# Altium schematic symbol library ACS712-05B.SchLib: 1 symbol
Pins are listed as number, name and electrical type; pins without a type are passive.

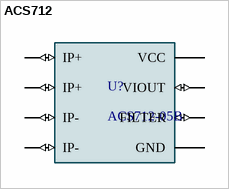
[diagram p0: symbol ACS712]

## ACS712
designator U?, comment ACS712-05B
Current Sensor 5A 1 Channel Hall Effect, Open Loop Bidirectional 8-SOIC _0.154, 3.90mm Width_; MF: Allegro; MP: ACS712ELCTR-05B-T; Value: ACS712-05B; SnapEDA_Link: https://www.snapeda.com/parts/ACS712ELCTR-05B-T/Allegro%20Industries/view-part/217679/?ref=snap; Availability: Unavailable; Package: SOIC-8 Allegro MicroSystems LLC; Price: None
footprint ACS712-05B (SOIC8-1.27-5X4MM)
pins: 1 IP+ (io), 2 IP+ (io), 3 IP- (io), 4 IP- (io), 5 GND, 6 FILTER (io), 7 VIOUT (io), 8 VCC (power)